# Altium schematic symbol library SchemLib.SchLib: 5 symbols
Pins are listed as number, name and electrical type; pins without a type are passive.

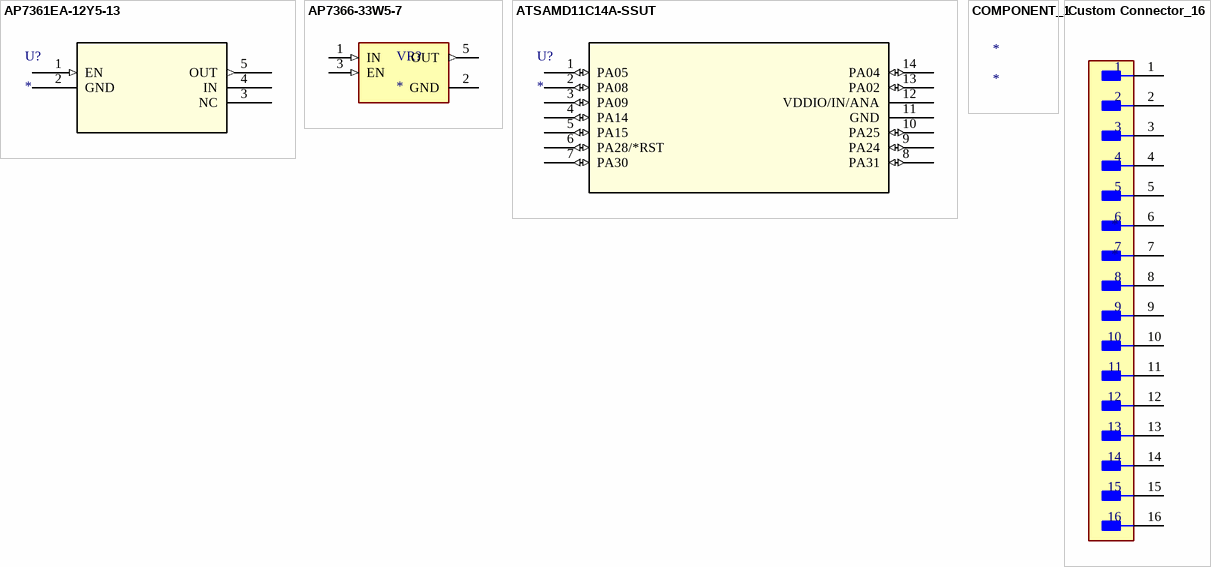
[diagram p0: symbols AP7361EA-12Y5-13 to Custom Connector_16]

## AP7361EA-12Y5-13
designator U?
No Description Available; Mfr_Name: Diodes Inc; Type: Power Management; RefDes: RefDes
footprint SOT89-5_DIO
pins: 1 EN (in), 2 GND (power), 3 NC, 4 IN (power), 5 OUT (out)

## AP7366-33W5-7
designator VR?
Linear Voltage Regulator IC 1 Output 600mA SOT-25; MP: AP7366-33W5-7; MF: Diodes Incorporated; Check_prices: https://www.snapeda.com/parts/AP7366-33W5-7/Diodes%20Inc./view-part/4625498/?ref=eda; Value: *; Purchase-URL: https://pricing.snapeda.com/search/part/AP7366-33W5-7/?ref=eda; SnapEDA_Link: https://www.snapeda.com/parts/AP7366-33W5-7/Diodes%20Inc./view-part/4625498/?ref=snap; Package: SOT-753 Diodes Incorporated; Digi-Key_Part_Number: AP7366-33W5-7DICT-ND
footprint SOT95P285X140-5N
pins: 1 IN (in), 2 GND (power), 3 EN (in), 5 OUT (out)

## ATSAMD11C14A-SSUT
designator U?
No Description Available; Mfr_Name: Microchip; RefDes: RefDes; Type: Type
footprint SOIC14_SL_MCH
pins: 1 PA05 (io), 2 PA08 (io), 3 PA09 (io), 4 PA14 (io), 5 PA15 (io), 6 PA28/*RST (io), 7 PA30 (io), 8 PA31 (io), 9 PA24 (io), 10 PA25 (io), 11 GND (power), 12 VDDIO/IN/ANA (power), 13 PA02 (io), 14 PA04 (io)

## COMPONENT_1
designator *

## Custom Connector_16
designator *
footprint Custom Connector_16
pins: 1, 2, 3, 4, 5, 6, 7, 8, 9, 10, 11, 12, 13, 14, 15, 16